# Altium integrated library PCA9306DP1_125.IntLib: 1 symbol
Pins are listed as number, name and electrical type; pins without a type are passive.

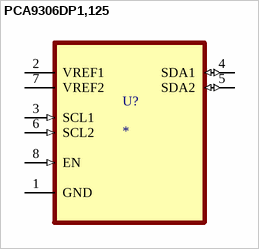
[diagram p0: symbol PCA9306DP1,125]

## PCA9306DP1,125
designator U?
Voltage Level Translator Bidirectional 1 Circuit 2 Channel - 8-TSSOP; MF: NXP USA; MP: PCA9306DP1,125; SnapEDA_Link: https://www.snapeda.com/parts/PCA9306DP1,125/NXP+Semiconductors/view-part/?ref=snap; Package: TSSOP-8 NXP Semiconductors; Value: *; Check_prices: https://www.snapeda.com/parts/PCA9306DP1,125/NXP+Semiconductors/view-part/?ref=eda
footprint SOP65P400X110-8N
pins: 1 GND, 2 VREF1 (power), 3 SCL1 (in), 4 SDA1 (io), 5 SDA2 (io), 6 SCL2 (in), 7 VREF2 (power), 8 EN (in)